# Altium footprint library Cole_.PcbLib: 175 footprints (part 6 of 11)
Each footprint in its own frame and in the unit in brackets; x right, y up, seen from the top. Pads: shape width x height; smd on the part's side, far side on the other; paste and mask are expansions set on the pad; w line width, h text height; cw(c..) or ccw(c..) is an arc to the next point about the centre after c.
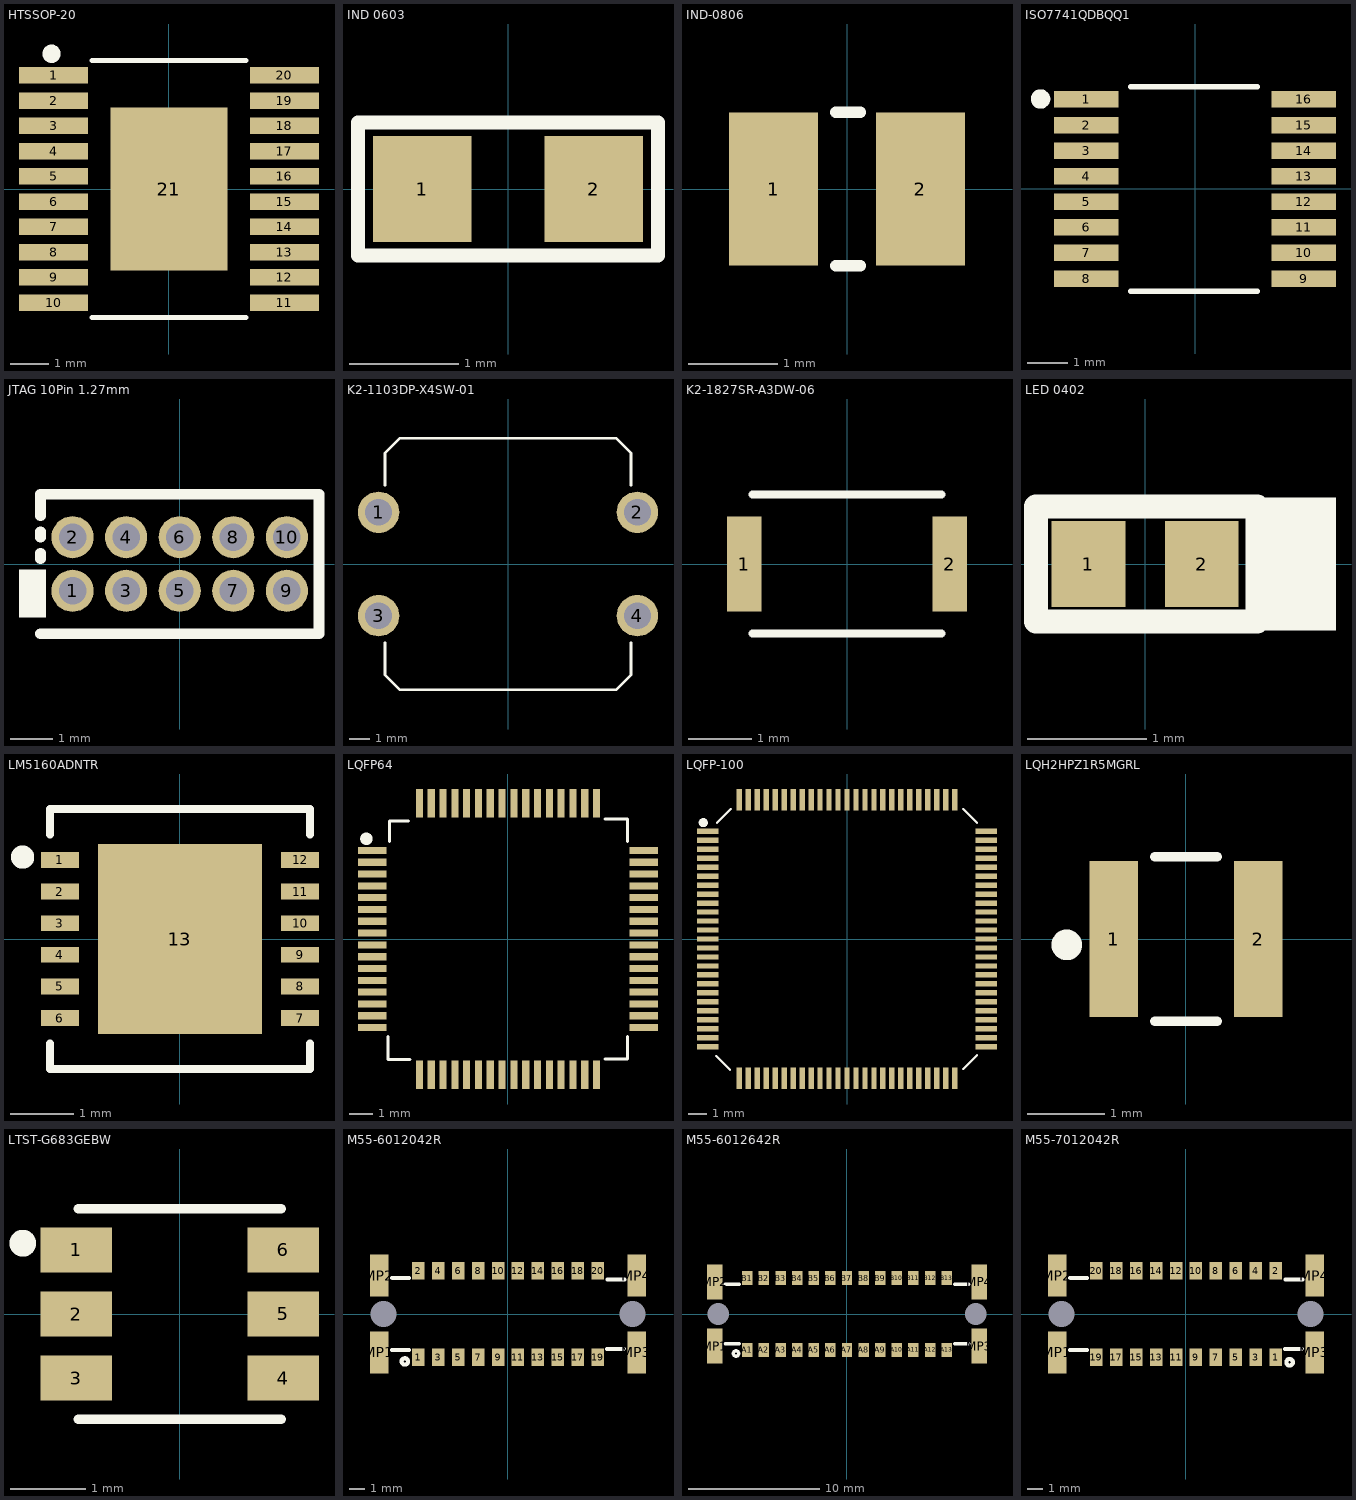
[diagram p5: the footprints below, top view; thin cyan lines are the x and y axes]

## HTSSOP-20 [mm]
pads (21):
  rect 1.78x0.42 smd: 1(-2.97,2.925) 2(-2.97,2.275) 3(-2.97,1.625) 4(-2.97,0.975) 5(-2.97,0.325) 6(-2.97,-0.325) 7(-2.97,-0.975) 8(-2.97,-1.625) 9(-2.97,-2.275) 10(-2.97,-2.925) 11(2.97,-2.925) 12(2.97,-2.275) 13(2.97,-1.625) 14(2.97,-0.975) 15(2.97,-0.325) 16(2.97,0.325) 17(2.97,0.975) 18(2.97,1.625) 19(2.97,2.275) 20(2.97,2.925)
  rect 3x4.2 smd: 21(0,0)
Top Overlay:
  circle w0.254: c-3.023,3.48 r0.108
  lines w0.127: -1.981,-3.302 1.981,-3.302 ; -1.981,3.302 1.981,3.302
3D body "User Library-HTSSOP20.step": height 0.96, standoff -0.05, extent -3.251,-3.25 3.163,3.25

## IND 0603 [mm]
pads (2):
  rect 0.9x0.97 smd: 1(-0.785,0) 2(0.785,0)
Top Overlay:
  lines w0.127: -1.372,-0.61 1.372,-0.61 1.372,0.61 -1.372,0.61 -1.372,-0.61
3D body "45630.stp": height 0.76, standoff -0.04, extent -0.8,-0.4 0.8,0.4

## IND-0806 [mm]
pads (2):
  rect 1x1.72 smd: 1(-0.825,0) 2(0.825,0)
Top Overlay:
  lines w0.127: -0.127,-0.864 0.152,-0.864 ; -0.127,0.864 0.152,0.864
3D body "1286AS-H-R47M=P2.STEP": height 1.2, standoff 0, extent -1,-0.8 1,0.8

## ISO7741QDBQQ1 [mm]
pads (16):
  rect 1.6x0.41 smd: 1(-2.7,2.222) 2(-2.7,1.587) 3(-2.7,0.953) 4(-2.7,0.318) 5(-2.7,-0.318) 6(-2.7,-0.953) 7(-2.7,-1.587) 8(-2.7,-2.222) 9(2.7,-2.222) 10(2.7,-1.587) 11(2.7,-0.953) 12(2.7,-0.318) 13(2.7,0.318) 14(2.7,0.953) 15(2.7,1.587) 16(2.7,2.222)
Top Overlay:
  circle w0.254: c-3.835,2.235 r0.114
  lines w0.127: -1.6,-2.54 1.549,-2.54 ; -1.6,2.54 1.549,2.54
3D body "User Library-SSOP16.step": height 1.1, standoff 0, extent -2.997,-2.489 2.997,2.489

## JTAG 10Pin 1.27mm [mm] "Male header 1.27mm 5x2 10-Pin"
pads (10):
  round 1 hole 0.65: 1(-2.54,-0.635) 2(-2.54,0.635) 3(-1.27,-0.635) 4(-1.27,0.635) 5(0,-0.635) 6(0,0.635) 7(1.27,-0.635) 8(1.27,0.635) 9(2.54,-0.635) 10(2.54,0.635)
Top Overlay:
  rectangle: -3.81,-1.27 -3.175,-0.127
  lines w0.254: -3.302,-1.651 3.302,-1.651 3.302,1.651 -3.302,1.651 -3.302,1.143 ; -3.302,0.127 -3.302,0.254 ; -3.302,0.635 -3.302,0.762
3D body "STEP-62201021121-rev1.stp": height 5.31, standoff -2.29, extent -3.175,-1.7 3.175,1.7

## K2-1103DP-X4SW-01 [mm] "? EasyEDA Model    Description  SPST 50mA @ 12VDC Vertical Round Button Through Hole Tactile Switches RoHS"
pads (4):
  round 2 hole 1.3: 1(-6.25,2.5) 2(6.25,2.5) 3(-6.25,-2.5) 4(6.25,-2.5)
Top Overlay:
  lines w0.127: -5.944,-3.81 -5.944,-5.359 -5.232,-6.071 -5.029,-6.071 5.232,-6.071 5.944,-5.359 5.944,-3.81 ; -5.944,3.81 -5.944,5.359 -5.232,6.071 -5.029,6.071 5.232,6.071 5.944,5.359 5.944,3.81
3D body "User Library-tact switch 12x12x8mm.step": height 8.5, standoff -3.5, extent -6.935,-6 6.935,6

## K2-1827SR-A3DW-06 [mm] "SPST 50mA @ 12VDC Vertical Round Button 3*2.1mm Tactile Switches RoHS"
pads (2):
  rect 0.55x1.5 smd: 1(-1.625,0) 2(1.625,0)
Top Overlay:
  lines w0.127: -1.5,-1.1 0,-1.1 1.5,-1.1 ; -1.5,1.1 0,1.1 1.5,1.1

## LED 0402 [mm]
pads (2):
  rect 0.62x0.72 smd: 1(-0.475,0) 2(0.475,0)
Top Overlay:
  rectangle: 0.94,-0.559 1.6,0.559
  lines w0.2: -0.914,-0.483 0.94,-0.483 0.94,0.483 -0.914,0.483 -0.914,-0.483
3D body "User Library-LED-0402.step": height 0.45, standoff 0, extent -0.505,-0.25 0.505,0.25

## LM5160ADNTR [mm]
pads (13):
  rect 0.6x0.25 smd: 1(-1.9,1.25) 2(-1.9,0.75) 3(-1.9,0.25) 4(-1.9,-0.25) 5(-1.9,-0.75) 6(-1.9,-1.25) 7(1.9,-1.25) 8(1.9,-0.75) 9(1.9,-0.25) 10(1.9,0.25) 11(1.9,0.75) 12(1.9,1.25)
  rect 2.6x3 smd: 13(0,0)
Top Overlay:
  circle w0.254: c-2.489,1.295 r0.057
  lines w0.127: -2.057,-1.651 -2.057,-2.057 2.057,-2.057 2.057,-1.651 ; -2.057,1.651 -2.057,2.057 2.057,2.057 2.057,1.651
3D body "LM5160ADNTR.STEP": height 1, standoff 0, extent -2,-2 2,2

## LQFP64 [mm] "IC MCU 32BIT 256KB FLASH 64LQFP"
pads (64):
  rect 1.2x0.3 smd: 1(-5.75,3.75) 2(-5.75,3.25) 3(-5.75,2.75) 4(-5.75,2.25) 5(-5.75,1.75) 6(-5.75,1.25) 7(-5.75,0.75) 8(-5.75,0.25) 9(-5.75,-0.25) 10(-5.75,-0.75) 11(-5.75,-1.25) 12(-5.75,-1.75) 13(-5.75,-2.25) 14(-5.75,-2.75) 15(-5.75,-3.25) 16(-5.75,-3.75) 33(5.75,-3.75) 34(5.75,-3.25) 35(5.75,-2.75) 36(5.75,-2.25) 37(5.75,-1.75) 38(5.75,-1.25) 39(5.75,-0.75) 40(5.75,-0.25) 41(5.75,0.25) 42(5.75,0.75) 43(5.75,1.25) 44(5.75,1.75) 45(5.75,2.25) 46(5.75,2.75) 47(5.75,3.25) 48(5.75,3.75)
  rect 0.3x1.2 smd: 17(-3.75,-5.75) 18(-3.25,-5.75) 19(-2.75,-5.75) 20(-2.25,-5.75) 21(-1.75,-5.75) 22(-1.25,-5.75) 23(-0.75,-5.75) 24(-0.25,-5.75) 25(0.25,-5.75) 26(0.75,-5.75) 27(1.25,-5.75) 28(1.75,-5.75) 29(2.25,-5.75) 30(2.75,-5.75) 31(3.25,-5.75) 32(3.75,-5.75) 49(3.75,5.75) 50(3.25,5.75) 51(2.75,5.75) 52(2.25,5.75) 53(1.75,5.75) 54(1.25,5.75) 55(0.75,5.75) 56(0.25,5.75) 57(-0.25,5.75) 58(-0.75,5.75) 59(-1.25,5.75) 60(-1.75,5.75) 61(-2.25,5.75) 62(-2.75,5.75) 63(-3.25,5.75) 64(-3.75,5.75)
Top Overlay:
  circle w0.254: c-5.994,4.242 r0.137
  lines w0.127: -5.08,-4.125 -5.08,-5.105 -4.14,-5.105 ; -5.015,4.125 -5.015,5 -4.205,5 ; 4.115,-5.08 5.055,-5.08 5.055,-4.125 ; 4.115,5.08 5.055,5.08 5.055,4.125
3D body "User Library-LQFP64-1.STEP": height 1.56, standoff 0, extent -6,-6 6,6

## LQFP-100 [mm]
pads (100):
  rect 1.2x0.3 smd: 1(-7.75,6) 2(-7.75,5.5) 3(-7.75,5) 4(-7.75,4.5) 5(-7.75,4) 6(-7.75,3.5) 7(-7.75,3) 8(-7.75,2.5) 9(-7.75,2) 10(-7.75,1.5) 11(-7.75,1) 12(-7.75,0.5) 13(-7.75,0) 14(-7.75,-0.5) 15(-7.75,-1) 16(-7.75,-1.5) 17(-7.75,-2) 18(-7.75,-2.5) 19(-7.75,-3) 20(-7.75,-3.5) 21(-7.75,-4) 22(-7.75,-4.5) 23(-7.75,-5) 24(-7.75,-5.5) 25(-7.75,-6) 51(7.75,-6) 52(7.75,-5.5) 53(7.75,-5) 54(7.75,-4.5) 55(7.75,-4) 56(7.75,-3.5) 57(7.75,-3) 58(7.75,-2.5) 59(7.75,-2) 60(7.75,-1.5) 61(7.75,-1) 62(7.75,-0.5) 63(7.75,0) 64(7.75,0.5) 65(7.75,1) 66(7.75,1.5) 67(7.75,2) 68(7.75,2.5) 69(7.75,3) 70(7.75,3.5) 71(7.75,4) 72(7.75,4.5) 73(7.75,5) 74(7.75,5.5) 75(7.75,6)
  rect 0.3x1.2 smd: 26(-6,-7.75) 27(-5.5,-7.75) 28(-5,-7.75) 29(-4.5,-7.75) 30(-4,-7.75) 31(-3.5,-7.75) 32(-3,-7.75) 33(-2.5,-7.75) 34(-2,-7.75) 35(-1.5,-7.75) 36(-1,-7.75) 37(-0.5,-7.75) 38(0,-7.75) 39(0.5,-7.75) 40(1,-7.75) 41(1.5,-7.75) 42(2,-7.75) 43(2.5,-7.75) 44(3,-7.75) 45(3.5,-7.75) 46(4,-7.75) 47(4.5,-7.75) 48(5,-7.75) 49(5.5,-7.75) 50(6,-7.75) 76(6,7.75) 77(5.5,7.75) 78(5,7.75) 79(4.5,7.75) 80(4,7.75) 81(3.5,7.75) 82(3,7.75) 83(2.5,7.75) 84(2,7.75) 85(1.5,7.75) 86(1,7.75) 87(0.5,7.75) 88(0,7.75) 89(-0.5,7.75) 90(-1,7.75) 91(-1.5,7.75) 92(-2,7.75) 93(-2.5,7.75) 94(-3,7.75) 95(-3.5,7.75) 96(-4,7.75) 97(-4.5,7.75) 98(-5,7.75) 99(-5.5,7.75) 100(-6,7.75)
Top Overlay:
  circle w0.254: c-8.001,6.477 r0.127
  lines w0.127: -7.273,-6.511 -6.511,-7.273 ; -7.239,6.477 -6.477,7.239 ; 6.477,-7.239 7.239,-6.477 ; 6.477,7.239 7.239,6.477
3D body "User Library-LQFP100_05.step": height 1.6, standoff 0, extent -8,-8 8,8

## LQH2HPZ1R5MGRL [mm]
pads (2):
  rect 0.627x2.02 smd: 1(-0.937,0) 2(0.938,0)
Top Overlay:
  circle w0.254: c-1.549,-0.076 r0.072
  lines w0.127: -0.406,-1.067 0.406,-1.067 ; -0.406,1.067 0.406,1.067
3D body "LQH2HPZ1R5MGRL.STEP": height 1, standoff 0, extent -1.25,-1 1.25,1

## LTST-G683GEBW [mm]
pads (6):
  rect 0.95x0.6 smd: 1(-1.375,0.85) 2(-1.375,0) 3(-1.375,-0.85) 4(1.375,-0.85) 5(1.375,0) 6(1.375,0.85)
Top Overlay:
  circle w0.254: c-2.083,0.94 r0.051
  lines w0.127: -1.349,-1.4 0,-1.4 1.349,-1.4 ; -1.349,1.4 0,1.4 1.349,1.4
3D body "LTST-G683GEBW.STEP": height 1.61, standoff -0.04, extent -1.75,-1.4 1.75,1.4

## M55-6012042R [mm]
pads (26):
  rect 0.8x1.1 smd: 1(-5.715,-2.75) 2(-5.715,2.75) 3(-4.445,-2.75) 4(-4.445,2.75) 5(-3.175,-2.75) 6(-3.175,2.75) 7(-1.905,-2.75) 8(-1.905,2.75) 9(-0.635,-2.75) 10(-0.635,2.75) 11(0.635,-2.75) 12(0.635,2.75) 13(1.905,-2.75) 14(1.905,2.75) 15(3.175,-2.75) 16(3.175,2.75) 17(4.445,-2.75) 18(4.445,2.75) 19(5.715,-2.75) 20(5.715,2.75)
  round 0 hole 1.65 unplated: MH1(-7.925,0) MH2(7.925,0)
  rect 1.2x2.7 smd: MP1(-8.21,-2.45) MP2(-8.21,2.45) MP3(8.21,-2.45) MP4(8.21,2.45)
Top Overlay:
  circle w0.254: c-6.579,-3.023 r0.203
  lines w0.254: -7.391,-2.286 -6.325,-2.286 ; -7.391,2.286 -6.325,2.286 ; 6.325,-2.235 7.391,-2.235 ; 6.35,2.21 7.417,2.21
3D body "m55-6012042_asm.stp": height 10.25, standoff -0.8, extent -8.864,-3.6 8.916,3.6

## M55-6012642R [mm]
pads (32):
  rect 0.8x1.1 smd: A1(-7.62,-2.75) A2(-6.35,-2.75) A3(-5.08,-2.75) A4(-3.81,-2.75) A5(-2.54,-2.75) A6(-1.27,-2.75) A7(0,-2.75) A8(1.27,-2.75) A9(2.54,-2.75) A10(3.81,-2.75) A11(5.08,-2.75) A12(6.35,-2.75) A13(7.62,-2.75) B1(-7.62,2.75) B2(-6.35,2.75) B3(-5.08,2.75) B4(-3.81,2.75) B5(-2.54,2.75) B6(-1.27,2.75) B7(0,2.75) B8(1.27,2.75) B9(2.54,2.75) B10(3.81,2.75) B11(5.08,2.75) B12(6.35,2.75) B13(7.62,2.75)
  round 0 hole 1.65 unplated: MH1(-9.83,0) MH2(9.83,0)
  rect 1.2x2.7 smd: MP1(-10.115,-2.45) MP2(-10.115,2.45) MP3(10.115,-2.45) MP4(10.115,2.45)
Top Overlay:
  circle w0.254: c-8.484,-3.023 r0.203
  lines w0.254: -9.296,-2.286 -8.23,-2.286 ; -9.296,2.286 -8.23,2.286 ; 8.23,-2.286 9.296,-2.286 ; 8.23,2.286 9.296,2.286
3D body "m55-6012642_asm.stp": height 9.02, standoff -0.8, extent -10.795,-3.603 10.795,3.631

## M55-7012042R [mm]
pads (26):
  rect 0.8x1.1 smd: 1(5.715,-2.75) 2(5.715,2.75) 3(4.445,-2.75) 4(4.445,2.75) 5(3.175,-2.75) 6(3.175,2.75) 7(1.905,-2.75) 8(1.905,2.75) 9(0.635,-2.75) 10(0.635,2.75) 11(-0.635,-2.75) 12(-0.635,2.75) 13(-1.905,-2.75) 14(-1.905,2.75) 15(-3.175,-2.75) 16(-3.175,2.75) 17(-4.445,-2.75) 18(-4.445,2.75) 19(-5.715,-2.75) 20(-5.715,2.75)
  round 0 hole 1.65 unplated: MH1(-7.925,0) MH2(7.925,0)
  rect 1.2x2.7 smd: MP1(-8.21,-2.45) MP2(-8.21,2.45) MP3(8.21,-2.45) MP4(8.21,2.45)
Top Overlay:
  circle w0.254: c6.604,-3.073 r0.203
  lines w0.254: -7.391,-2.286 -6.325,-2.286 ; -7.391,2.286 -6.325,2.286 ; 6.325,-2.235 7.391,-2.235 ; 6.35,2.21 7.417,2.21
3D body "m55-7012042_asm.stp": height 8.25, standoff -0.75, extent -8.89,-3.6 8.89,3.6